# Altium footprint library MY_LIB_Connectors.PcbLib: 358 footprints (part 16 of 23)
Each footprint in its own frame and in the unit in brackets; x right, y up, seen from the top. Pads: shape width x height; smd on the part's side, far side on the other; paste and mask are expansions set on the pad; w line width, h text height; cw(c..) or ccw(c..) is an arc to the next point about the centre after c.
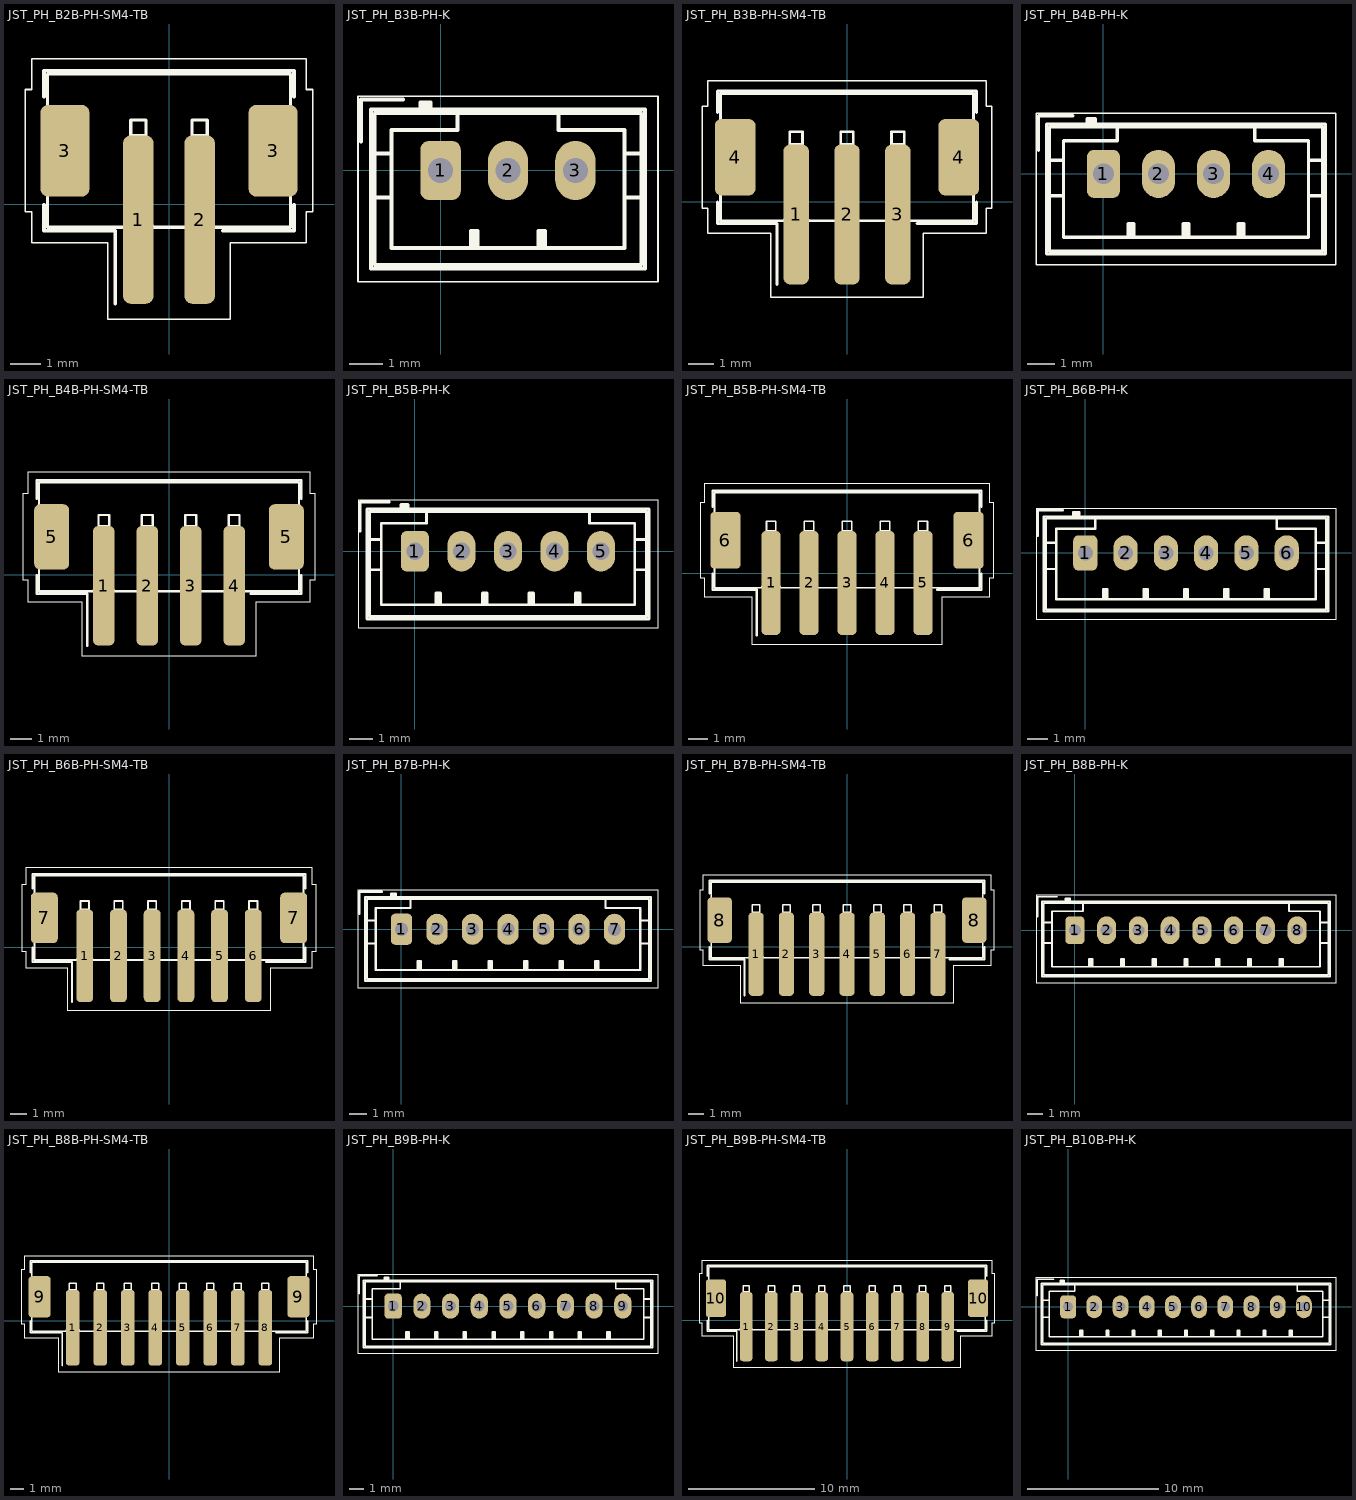
[diagram p15: the footprints below, top view; thin cyan lines are the x and y axes]

## JST_PH_B2B-PH-SM4-TB [mm] "JST B2B-PH-SM4-TB; reviewed KiCad footprint; ready STEP reference model"
height 6.725
pads (4):
  rrect50% 1x5.5 all layers, no hole: 1(-1,-0.5) 2(1,-0.5)
  rrect31% 1.6x3 all layers, no hole: 3(-3.4,1.75) 3(3.4,1.75)
Top Overlay:
  lines w0.05: -4.7,-0.25 -4.7,3.75 -4.48,3.75 -4.48,4.75 4.48,4.75 4.48,3.75 4.7,3.75 4.7,-0.25 4.48,-0.25 4.48,-1.25 2,-1.25 2,-3.75 -2,-3.75 -2,-1.25 -4.48,-1.25 -4.48,-0.25 -4.7,-0.25
  lines w0.1: -1.5,-0.75 -1,-0.043 -0.5,-0.75 ; -3.975,-0.75 -3.975,4.25 3.975,4.25 3.975,-0.75 -3.975,-0.75 ; -1.25,2.25 -0.75,2.25 -0.75,2.75 -1.25,2.75 -1.25,2.25 ; 0.75,2.25 1.25,2.25 1.25,2.75 0.75,2.75 0.75,2.25
  lines w0.12: -4.085,-0.01 -4.085,-0.86 -1.76,-0.86 -1.76,-3.25 ; -4.085,3.51 -4.085,4.36 4.085,4.36 4.085,3.51 ; 1.76,-0.86 4.085,-0.86 4.085,-0.01
3D body "JST-B2B-PH-SM4-TB.STEP": height 6.73, standoff 0, extent -3.975,-0.75 3.975,4.25

## JST_PH_B3B-PH-K [mm] "JST B3B-PH-K; reviewed KiCad footprint; ready STEP reference model"
height 6
pads (3):
  rrect42% 1.2x1.75 hole 0.75: 1(0,0)
  oval 1.2x1.75 hole 0.75: 2(2,0) 3(4,0)
Top Overlay:
  lines w0.05: -2.45,-3.3 -2.45,2.2 6.45,2.2 6.45,-3.3 -2.45,-3.3
  lines w0.1: -2.36,0.86 -2.36,2.11 -1.11,2.11 ; -1.95,-2.8 -1.95,1.7 5.95,1.7 5.95,-2.8 -1.95,-2.8
  lines w0.12: -2.36,0.86 -2.36,2.11 -1.11,2.11 ; -2.06,-0.8 -1.45,-0.8 ; -2.06,0.5 -1.45,0.5 ; -0.6,1.81 -0.6,2.01 -0.3,2.01 -0.3,1.81 ; -0.6,1.91 -0.3,1.91 ; 0.5,1.81 0.5,1.2 -1.45,1.2 -1.45,-2.3 5.45,-2.3 5.45,1.2 3.5,1.2 3.5,1.81 ; 0.9,-2.3 0.9,-1.8 1.1,-1.8 1.1,-2.3 ; 1,-2.3 1,-1.8 ; 2.9,-2.3 2.9,-1.8 3.1,-1.8 3.1,-2.3 ; 3,-2.3 3,-1.8 ; 5.45,-0.8 6.06,-0.8 ; 5.45,0.5 6.06,0.5 ; -2.06,-2.91 -2.06,1.81 6.06,1.81 6.06,-2.91 -2.06,-2.91
3D body "JST_PH_B3B-PH-K_1x03_P2.00mm_Vertical.step": height 6, standoff -3.4, extent -2.36,-2.8 5.95,2.11

## JST_PH_B3B-PH-SM4-TB [mm] "JST B3B-PH-SM4-TB; reviewed KiCad footprint; ready STEP reference model"
height 6.725
pads (5):
  rrect50% 1x5.5 all layers, no hole: 1(-2,-0.5) 2(0,-0.5) 3(2,-0.5)
  rrect31% 1.6x3 all layers, no hole: 4(-4.4,1.75) 4(4.4,1.75)
Top Overlay:
  lines w0.05: -5.7,-0.25 -5.7,3.75 -5.48,3.75 -5.48,4.75 5.48,4.75 5.48,3.75 5.7,3.75 5.7,-0.25 5.48,-0.25 5.48,-1.25 3,-1.25 3,-3.75 -3,-3.75 -3,-1.25 -5.48,-1.25 -5.48,-0.25 -5.7,-0.25
  lines w0.1: -2.5,-0.75 -2,-0.043 -1.5,-0.75 ; -4.975,-0.75 -4.975,4.25 4.975,4.25 4.975,-0.75 -4.975,-0.75 ; -2.25,2.25 -1.75,2.25 -1.75,2.75 -2.25,2.75 -2.25,2.25 ; -0.25,2.25 0.25,2.25 0.25,2.75 -0.25,2.75 -0.25,2.25 ; 1.75,2.25 2.25,2.25 2.25,2.75 1.75,2.75 1.75,2.25
  lines w0.12: -5.085,-0.01 -5.085,-0.86 -2.76,-0.86 -2.76,-3.25 ; -5.085,3.51 -5.085,4.36 5.085,4.36 5.085,3.51 ; 2.76,-0.86 5.085,-0.86 5.085,-0.01
3D body "JST-B3B-PH-SM4-TB.STEP": height 6.73, standoff 0, extent -4.975,-0.75 4.975,4.25

## JST_PH_B4B-PH-K [mm] "JST B4B-PH-K; reviewed KiCad footprint; ready STEP reference model"
height 6
pads (4):
  rrect42% 1.2x1.75 hole 0.75: 1(0,0)
  oval 1.2x1.75 hole 0.75: 2(2,0) 3(4,0) 4(6,0)
Top Overlay:
  lines w0.05: -2.45,-3.3 -2.45,2.2 8.45,2.2 8.45,-3.3 -2.45,-3.3
  lines w0.1: -2.36,0.86 -2.36,2.11 -1.11,2.11 ; -1.95,-2.8 -1.95,1.7 7.95,1.7 7.95,-2.8 -1.95,-2.8
  lines w0.12: -2.36,0.86 -2.36,2.11 -1.11,2.11 ; -2.06,-0.8 -1.45,-0.8 ; -2.06,0.5 -1.45,0.5 ; -0.6,1.81 -0.6,2.01 -0.3,2.01 -0.3,1.81 ; -0.6,1.91 -0.3,1.91 ; 0.5,1.81 0.5,1.2 -1.45,1.2 -1.45,-2.3 7.45,-2.3 7.45,1.2 5.5,1.2 5.5,1.81 ; 0.9,-2.3 0.9,-1.8 1.1,-1.8 1.1,-2.3 ; 1,-2.3 1,-1.8 ; 2.9,-2.3 2.9,-1.8 3.1,-1.8 3.1,-2.3 ; 3,-2.3 3,-1.8 ; 4.9,-2.3 4.9,-1.8 5.1,-1.8 5.1,-2.3 ; 5,-2.3 5,-1.8 ; 7.45,-0.8 8.06,-0.8 ; 7.45,0.5 8.06,0.5 ; -2.06,-2.91 -2.06,1.81 8.06,1.81 8.06,-2.91 -2.06,-2.91
3D body "JST_PH_B4B-PH-K_1x04_P2.00mm_Vertical.step": height 6, standoff -3.4, extent -2.36,-2.8 7.95,2.11

## JST_PH_B4B-PH-SM4-TB [mm] "JST B4B-PH-SM4-TB; reviewed KiCad footprint; ready STEP reference model"
height 6.725
pads (6):
  rrect50% 1x5.5 all layers, no hole: 1(-3,-0.5) 2(-1,-0.5) 3(1,-0.5) 4(3,-0.5)
  rrect31% 1.6x3 all layers, no hole: 5(-5.4,1.75) 5(5.4,1.75)
Top Overlay:
  lines w0.05: -6.7,-0.25 -6.7,3.75 -6.48,3.75 -6.48,4.75 6.48,4.75 6.48,3.75 6.7,3.75 6.7,-0.25 6.48,-0.25 6.48,-1.25 4,-1.25 4,-3.75 -4,-3.75 -4,-1.25 -6.48,-1.25 -6.48,-0.25 -6.7,-0.25
  lines w0.1: -3.5,-0.75 -3,-0.043 -2.5,-0.75 ; -5.975,-0.75 -5.975,4.25 5.975,4.25 5.975,-0.75 -5.975,-0.75 ; -3.25,2.25 -2.75,2.25 -2.75,2.75 -3.25,2.75 -3.25,2.25 ; -1.25,2.25 -0.75,2.25 -0.75,2.75 -1.25,2.75 -1.25,2.25 ; 0.75,2.25 1.25,2.25 1.25,2.75 0.75,2.75 0.75,2.25 ; 2.75,2.25 3.25,2.25 3.25,2.75 2.75,2.75 2.75,2.25
  lines w0.12: -6.085,-0.01 -6.085,-0.86 -3.76,-0.86 -3.76,-3.25 ; -6.085,3.51 -6.085,4.36 6.085,4.36 6.085,3.51 ; 3.76,-0.86 6.085,-0.86 6.085,-0.01
3D body "JST-B4B-PH-SM4-TB.STEP": height 6.73, standoff 0, extent -5.975,-0.75 5.975,4.25

## JST_PH_B5B-PH-K [mm] "JST B5B-PH-K; reviewed KiCad footprint; ready STEP reference model"
height 6
pads (5):
  rrect42% 1.2x1.75 hole 0.75: 1(0,0)
  oval 1.2x1.75 hole 0.75: 2(2,0) 3(4,0) 4(6,0) 5(8,0)
Top Overlay:
  lines w0.05: -2.45,-3.3 -2.45,2.2 10.45,2.2 10.45,-3.3 -2.45,-3.3
  lines w0.1: -2.36,0.86 -2.36,2.11 -1.11,2.11 ; -1.95,-2.8 -1.95,1.7 9.95,1.7 9.95,-2.8 -1.95,-2.8
  lines w0.12: -2.36,0.86 -2.36,2.11 -1.11,2.11 ; -2.06,-0.8 -1.45,-0.8 ; -2.06,0.5 -1.45,0.5 ; -0.6,1.81 -0.6,2.01 -0.3,2.01 -0.3,1.81 ; -0.6,1.91 -0.3,1.91 ; 0.5,1.81 0.5,1.2 -1.45,1.2 -1.45,-2.3 9.45,-2.3 9.45,1.2 7.5,1.2 7.5,1.81 ; 0.9,-2.3 0.9,-1.8 1.1,-1.8 1.1,-2.3 ; 1,-2.3 1,-1.8 ; 2.9,-2.3 2.9,-1.8 3.1,-1.8 3.1,-2.3 ; 3,-2.3 3,-1.8 ; 4.9,-2.3 4.9,-1.8 5.1,-1.8 5.1,-2.3 ; 5,-2.3 5,-1.8 ; 6.9,-2.3 6.9,-1.8 7.1,-1.8 7.1,-2.3 ; 7,-2.3 7,-1.8 ; 9.45,-0.8 10.06,-0.8 ; 9.45,0.5 10.06,0.5 ; -2.06,-2.91 -2.06,1.81 10.06,1.81 10.06,-2.91 -2.06,-2.91
3D body "JST_PH_B5B-PH-K_1x05_P2.00mm_Vertical.step": height 6, standoff -3.4, extent -2.36,-2.8 9.95,2.11

## JST_PH_B5B-PH-SM4-TB [mm] "JST B5B-PH-SM4-TB; reviewed KiCad footprint; ready STEP reference model"
height 6.725
pads (7):
  rrect50% 1x5.5 all layers, no hole: 1(-4,-0.5) 2(-2,-0.5) 3(0,-0.5) 4(2,-0.5) 5(4,-0.5)
  rrect31% 1.6x3 all layers, no hole: 6(-6.4,1.75) 6(6.4,1.75)
Top Overlay:
  lines w0.05: -7.7,-0.25 -7.7,3.75 -7.48,3.75 -7.48,4.75 7.48,4.75 7.48,3.75 7.7,3.75 7.7,-0.25 7.48,-0.25 7.48,-1.25 5,-1.25 5,-3.75 -5,-3.75 -5,-1.25 -7.48,-1.25 -7.48,-0.25 -7.7,-0.25
  lines w0.1: -4.5,-0.75 -4,-0.043 -3.5,-0.75 ; -6.975,-0.75 -6.975,4.25 6.975,4.25 6.975,-0.75 -6.975,-0.75 ; -4.25,2.25 -3.75,2.25 -3.75,2.75 -4.25,2.75 -4.25,2.25 ; -2.25,2.25 -1.75,2.25 -1.75,2.75 -2.25,2.75 -2.25,2.25 ; -0.25,2.25 0.25,2.25 0.25,2.75 -0.25,2.75 -0.25,2.25 ; 1.75,2.25 2.25,2.25 2.25,2.75 1.75,2.75 1.75,2.25 ; 3.75,2.25 4.25,2.25 4.25,2.75 3.75,2.75 3.75,2.25
  lines w0.12: -7.085,-0.01 -7.085,-0.86 -4.76,-0.86 -4.76,-3.25 ; -7.085,3.51 -7.085,4.36 7.085,4.36 7.085,3.51 ; 4.76,-0.86 7.085,-0.86 7.085,-0.01
3D body "JST-B5B-PH-SM4-TB.STEP": height 6.73, standoff 0, extent -6.975,-0.75 6.975,4.25

## JST_PH_B6B-PH-K [mm] "JST B6B-PH-K; reviewed KiCad footprint; ready STEP reference model"
height 6
pads (6):
  rrect42% 1.2x1.75 hole 0.75: 1(0,0)
  oval 1.2x1.75 hole 0.75: 2(2,0) 3(4,0) 4(6,0) 5(8,0) 6(10,0)
Top Overlay:
  lines w0.05: -2.45,-3.3 -2.45,2.2 12.45,2.2 12.45,-3.3 -2.45,-3.3
  lines w0.1: -2.36,0.86 -2.36,2.11 -1.11,2.11 ; -1.95,-2.8 -1.95,1.7 11.95,1.7 11.95,-2.8 -1.95,-2.8
  lines w0.12: -2.36,0.86 -2.36,2.11 -1.11,2.11 ; -2.06,-0.8 -1.45,-0.8 ; -2.06,0.5 -1.45,0.5 ; -0.6,1.81 -0.6,2.01 -0.3,2.01 -0.3,1.81 ; -0.6,1.91 -0.3,1.91 ; 0.5,1.81 0.5,1.2 -1.45,1.2 -1.45,-2.3 11.45,-2.3 11.45,1.2 9.5,1.2 9.5,1.81 ; 0.9,-2.3 0.9,-1.8 1.1,-1.8 1.1,-2.3 ; 1,-2.3 1,-1.8 ; 2.9,-2.3 2.9,-1.8 3.1,-1.8 3.1,-2.3 ; 3,-2.3 3,-1.8 ; 4.9,-2.3 4.9,-1.8 5.1,-1.8 5.1,-2.3 ; 5,-2.3 5,-1.8 ; 6.9,-2.3 6.9,-1.8 7.1,-1.8 7.1,-2.3 ; 7,-2.3 7,-1.8 ; 8.9,-2.3 8.9,-1.8 9.1,-1.8 9.1,-2.3 ; 9,-2.3 9,-1.8 ; 11.45,-0.8 12.06,-0.8 ; 11.45,0.5 12.06,0.5 ; -2.06,-2.91 -2.06,1.81 12.06,1.81 12.06,-2.91 -2.06,-2.91
3D body "JST_PH_B6B-PH-K_1x06_P2.00mm_Vertical.step": height 6, standoff -3.4, extent -2.36,-2.8 11.95,2.11

## JST_PH_B6B-PH-SM4-TB [mm] "JST B6B-PH-SM4-TB; reviewed KiCad footprint; ready STEP reference model"
height 6.725
pads (8):
  rrect50% 1x5.5 all layers, no hole: 1(-5,-0.5) 2(-3,-0.5) 3(-1,-0.5) 4(1,-0.5) 5(3,-0.5) 6(5,-0.5)
  rrect31% 1.6x3 all layers, no hole: 7(-7.4,1.75) 7(7.4,1.75)
Top Overlay:
  lines w0.05: -8.7,-0.25 -8.7,3.75 -8.48,3.75 -8.48,4.75 8.48,4.75 8.48,3.75 8.7,3.75 8.7,-0.25 8.48,-0.25 8.48,-1.25 6,-1.25 6,-3.75 -6,-3.75 -6,-1.25 -8.48,-1.25 -8.48,-0.25 -8.7,-0.25
  lines w0.1: -5.5,-0.75 -5,-0.043 -4.5,-0.75 ; -7.975,-0.75 -7.975,4.25 7.975,4.25 7.975,-0.75 -7.975,-0.75 ; -5.25,2.25 -4.75,2.25 -4.75,2.75 -5.25,2.75 -5.25,2.25 ; -3.25,2.25 -2.75,2.25 -2.75,2.75 -3.25,2.75 -3.25,2.25 ; -1.25,2.25 -0.75,2.25 -0.75,2.75 -1.25,2.75 -1.25,2.25 ; 0.75,2.25 1.25,2.25 1.25,2.75 0.75,2.75 0.75,2.25 ; 2.75,2.25 3.25,2.25 3.25,2.75 2.75,2.75 2.75,2.25 ; 4.75,2.25 5.25,2.25 5.25,2.75 4.75,2.75 4.75,2.25
  lines w0.12: -8.085,-0.01 -8.085,-0.86 -5.76,-0.86 -5.76,-3.25 ; -8.085,3.51 -8.085,4.36 8.085,4.36 8.085,3.51 ; 5.76,-0.86 8.085,-0.86 8.085,-0.01
3D body "JST-B6B-PH-SM4-TB.STEP": height 6.73, standoff 0, extent -7.975,-0.75 7.975,4.25

## JST_PH_B7B-PH-K [mm] "JST B7B-PH-K; reviewed KiCad footprint; ready STEP reference model"
height 6
pads (7):
  rrect42% 1.2x1.75 hole 0.75: 1(0,0)
  oval 1.2x1.75 hole 0.75: 2(2,0) 3(4,0) 4(6,0) 5(8,0) 6(10,0) 7(12,0)
Top Overlay:
  lines w0.05: -2.45,-3.3 -2.45,2.2 14.45,2.2 14.45,-3.3 -2.45,-3.3
  lines w0.1: -2.36,0.86 -2.36,2.11 -1.11,2.11 ; -1.95,-2.8 -1.95,1.7 13.95,1.7 13.95,-2.8 -1.95,-2.8
  lines w0.12: -2.36,0.86 -2.36,2.11 -1.11,2.11 ; -2.06,-0.8 -1.45,-0.8 ; -2.06,0.5 -1.45,0.5 ; -0.6,1.81 -0.6,2.01 -0.3,2.01 -0.3,1.81 ; -0.6,1.91 -0.3,1.91 ; 0.5,1.81 0.5,1.2 -1.45,1.2 -1.45,-2.3 13.45,-2.3 13.45,1.2 11.5,1.2 11.5,1.81 ; 0.9,-2.3 0.9,-1.8 1.1,-1.8 1.1,-2.3 ; 1,-2.3 1,-1.8 ; 2.9,-2.3 2.9,-1.8 3.1,-1.8 3.1,-2.3 ; 3,-2.3 3,-1.8 ; 4.9,-2.3 4.9,-1.8 5.1,-1.8 5.1,-2.3 ; 5,-2.3 5,-1.8 ; 6.9,-2.3 6.9,-1.8 7.1,-1.8 7.1,-2.3 ; 7,-2.3 7,-1.8 ; 8.9,-2.3 8.9,-1.8 9.1,-1.8 9.1,-2.3 ; 9,-2.3 9,-1.8 ; 10.9,-2.3 10.9,-1.8 11.1,-1.8 11.1,-2.3 ; 11,-2.3 11,-1.8 ; 13.45,-0.8 14.06,-0.8 ; 13.45,0.5 14.06,0.5 ; -2.06,-2.91 -2.06,1.81 14.06,1.81 14.06,-2.91 -2.06,-2.91
3D body "JST_PH_B7B-PH-K_1x07_P2.00mm_Vertical.step": height 6, standoff -3.4, extent -2.36,-2.8 13.95,2.11

## JST_PH_B7B-PH-SM4-TB [mm] "JST B7B-PH-SM4-TB; reviewed KiCad footprint; ready STEP reference model"
height 6.725
pads (9):
  rrect50% 1x5.5 all layers, no hole: 1(-6,-0.5) 2(-4,-0.5) 3(-2,-0.5) 4(0,-0.5) 5(2,-0.5) 6(4,-0.5) 7(6,-0.5)
  rrect31% 1.6x3 all layers, no hole: 8(-8.4,1.75) 8(8.4,1.75)
Top Overlay:
  lines w0.05: -9.7,-0.25 -9.7,3.75 -9.48,3.75 -9.48,4.75 9.48,4.75 9.48,3.75 9.7,3.75 9.7,-0.25 9.48,-0.25 9.48,-1.25 7,-1.25 7,-3.75 -7,-3.75 -7,-1.25 -9.48,-1.25 -9.48,-0.25 -9.7,-0.25
  lines w0.1: -6.5,-0.75 -6,-0.043 -5.5,-0.75 ; -8.975,-0.75 -8.975,4.25 8.975,4.25 8.975,-0.75 -8.975,-0.75 ; -6.25,2.25 -5.75,2.25 -5.75,2.75 -6.25,2.75 -6.25,2.25 ; -4.25,2.25 -3.75,2.25 -3.75,2.75 -4.25,2.75 -4.25,2.25 ; -2.25,2.25 -1.75,2.25 -1.75,2.75 -2.25,2.75 -2.25,2.25 ; -0.25,2.25 0.25,2.25 0.25,2.75 -0.25,2.75 -0.25,2.25 ; 1.75,2.25 2.25,2.25 2.25,2.75 1.75,2.75 1.75,2.25 ; 3.75,2.25 4.25,2.25 4.25,2.75 3.75,2.75 3.75,2.25 ; 5.75,2.25 6.25,2.25 6.25,2.75 5.75,2.75 5.75,2.25
  lines w0.12: -9.085,-0.01 -9.085,-0.86 -6.76,-0.86 -6.76,-3.25 ; -9.085,3.51 -9.085,4.36 9.085,4.36 9.085,3.51 ; 6.76,-0.86 9.085,-0.86 9.085,-0.01
3D body "JST-B7B-PH-SM4-TB.STEP": height 6.73, standoff 0, extent -8.975,-0.75 8.975,4.25

## JST_PH_B8B-PH-K [mm] "JST B8B-PH-K; reviewed KiCad footprint; ready STEP reference model"
height 6
pads (8):
  rrect42% 1.2x1.75 hole 0.75: 1(0,0)
  oval 1.2x1.75 hole 0.75: 2(2,0) 3(4,0) 4(6,0) 5(8,0) 6(10,0) 7(12,0) 8(14,0)
Top Overlay:
  lines w0.05: -2.45,-3.3 -2.45,2.2 16.45,2.2 16.45,-3.3 -2.45,-3.3
  lines w0.1: -2.36,0.86 -2.36,2.11 -1.11,2.11 ; -1.95,-2.8 -1.95,1.7 15.95,1.7 15.95,-2.8 -1.95,-2.8
  lines w0.12: -2.36,0.86 -2.36,2.11 -1.11,2.11 ; -2.06,-0.8 -1.45,-0.8 ; -2.06,0.5 -1.45,0.5 ; -0.6,1.81 -0.6,2.01 -0.3,2.01 -0.3,1.81 ; -0.6,1.91 -0.3,1.91 ; 0.5,1.81 0.5,1.2 -1.45,1.2 -1.45,-2.3 15.45,-2.3 15.45,1.2 13.5,1.2 13.5,1.81 ; 0.9,-2.3 0.9,-1.8 1.1,-1.8 1.1,-2.3 ; 1,-2.3 1,-1.8 ; 2.9,-2.3 2.9,-1.8 3.1,-1.8 3.1,-2.3 ; 3,-2.3 3,-1.8 ; 4.9,-2.3 4.9,-1.8 5.1,-1.8 5.1,-2.3 ; 5,-2.3 5,-1.8 ; 6.9,-2.3 6.9,-1.8 7.1,-1.8 7.1,-2.3 ; 7,-2.3 7,-1.8 ; 8.9,-2.3 8.9,-1.8 9.1,-1.8 9.1,-2.3 ; 9,-2.3 9,-1.8 ; 10.9,-2.3 10.9,-1.8 11.1,-1.8 11.1,-2.3 ; 11,-2.3 11,-1.8 ; 12.9,-2.3 12.9,-1.8 13.1,-1.8 13.1,-2.3 ; 13,-2.3 13,-1.8 ; 15.45,-0.8 16.06,-0.8 ; 15.45,0.5 16.06,0.5 ; -2.06,-2.91 -2.06,1.81 16.06,1.81 16.06,-2.91 -2.06,-2.91
3D body "JST_PH_B8B-PH-K_1x08_P2.00mm_Vertical.step": height 6, standoff -3.4, extent -2.36,-2.8 15.95,2.11

## JST_PH_B8B-PH-SM4-TB [mm] "JST B8B-PH-SM4-TB; reviewed KiCad footprint; ready STEP reference model"
height 6.725
pads (10):
  rrect50% 1x5.5 all layers, no hole: 1(-7,-0.5) 2(-5,-0.5) 3(-3,-0.5) 4(-1,-0.5) 5(1,-0.5) 6(3,-0.5) 7(5,-0.5) 8(7,-0.5)
  rrect31% 1.6x3 all layers, no hole: 9(-9.4,1.75) 9(9.4,1.75)
Top Overlay:
  lines w0.05: -10.7,-0.25 -10.7,3.75 -10.48,3.75 -10.48,4.75 10.48,4.75 10.48,3.75 10.7,3.75 10.7,-0.25 10.48,-0.25 10.48,-1.25 8,-1.25 8,-3.75 -8,-3.75 -8,-1.25 -10.48,-1.25 -10.48,-0.25 -10.7,-0.25
  lines w0.1: -7.5,-0.75 -7,-0.043 -6.5,-0.75 ; -9.975,-0.75 -9.975,4.25 9.975,4.25 9.975,-0.75 -9.975,-0.75 ; -7.25,2.25 -6.75,2.25 -6.75,2.75 -7.25,2.75 -7.25,2.25 ; -5.25,2.25 -4.75,2.25 -4.75,2.75 -5.25,2.75 -5.25,2.25 ; -3.25,2.25 -2.75,2.25 -2.75,2.75 -3.25,2.75 -3.25,2.25 ; -1.25,2.25 -0.75,2.25 -0.75,2.75 -1.25,2.75 -1.25,2.25 ; 0.75,2.25 1.25,2.25 1.25,2.75 0.75,2.75 0.75,2.25 ; 2.75,2.25 3.25,2.25 3.25,2.75 2.75,2.75 2.75,2.25 ; 4.75,2.25 5.25,2.25 5.25,2.75 4.75,2.75 4.75,2.25 ; 6.75,2.25 7.25,2.25 7.25,2.75 6.75,2.75 6.75,2.25
  lines w0.12: -10.085,-0.01 -10.085,-0.86 -7.76,-0.86 -7.76,-3.25 ; -10.085,3.51 -10.085,4.36 10.085,4.36 10.085,3.51 ; 7.76,-0.86 10.085,-0.86 10.085,-0.01
3D body "JST-B8B-PH-SM4-TB.STEP": height 6.73, standoff 0, extent -9.975,-0.75 9.975,4.25

## JST_PH_B9B-PH-K [mm] "JST B9B-PH-K; reviewed KiCad footprint; ready STEP reference model"
height 6
pads (9):
  rrect42% 1.2x1.75 hole 0.75: 1(0,0)
  oval 1.2x1.75 hole 0.75: 2(2,0) 3(4,0) 4(6,0) 5(8,0) 6(10,0) 7(12,0) 8(14,0) 9(16,0)
Top Overlay:
  lines w0.05: -2.45,-3.3 -2.45,2.2 18.45,2.2 18.45,-3.3 -2.45,-3.3
  lines w0.1: -2.36,0.86 -2.36,2.11 -1.11,2.11 ; -1.95,-2.8 -1.95,1.7 17.95,1.7 17.95,-2.8 -1.95,-2.8
  lines w0.12: -2.36,0.86 -2.36,2.11 -1.11,2.11 ; -2.06,-0.8 -1.45,-0.8 ; -2.06,0.5 -1.45,0.5 ; -0.6,1.81 -0.6,2.01 -0.3,2.01 -0.3,1.81 ; -0.6,1.91 -0.3,1.91 ; 0.5,1.81 0.5,1.2 -1.45,1.2 -1.45,-2.3 17.45,-2.3 17.45,1.2 15.5,1.2 15.5,1.81 ; 0.9,-2.3 0.9,-1.8 1.1,-1.8 1.1,-2.3 ; 1,-2.3 1,-1.8 ; 2.9,-2.3 2.9,-1.8 3.1,-1.8 3.1,-2.3 ; 3,-2.3 3,-1.8 ; 4.9,-2.3 4.9,-1.8 5.1,-1.8 5.1,-2.3 ; 5,-2.3 5,-1.8 ; 6.9,-2.3 6.9,-1.8 7.1,-1.8 7.1,-2.3 ; 7,-2.3 7,-1.8 ; 8.9,-2.3 8.9,-1.8 9.1,-1.8 9.1,-2.3 ; 9,-2.3 9,-1.8 ; 10.9,-2.3 10.9,-1.8 11.1,-1.8 11.1,-2.3 ; 11,-2.3 11,-1.8 ; 12.9,-2.3 12.9,-1.8 13.1,-1.8 13.1,-2.3 ; 13,-2.3 13,-1.8 ; 14.9,-2.3 14.9,-1.8 15.1,-1.8 15.1,-2.3 ; 15,-2.3 15,-1.8 ; 17.45,-0.8 18.06,-0.8 ; 17.45,0.5 18.06,0.5 ; -2.06,-2.91 -2.06,1.81 18.06,1.81 18.06,-2.91 -2.06,-2.91
3D body "JST_PH_B9B-PH-K_1x09_P2.00mm_Vertical.step": height 6, standoff -3.4, extent -2.36,-2.8 17.95,2.11

## JST_PH_B9B-PH-SM4-TB [mm] "JST B9B-PH-SM4-TB; reviewed KiCad footprint; ready STEP reference model"
height 6.725
pads (11):
  rrect50% 1x5.5 all layers, no hole: 1(-8,-0.5) 2(-6,-0.5) 3(-4,-0.5) 4(-2,-0.5) 5(0,-0.5) 6(2,-0.5) 7(4,-0.5) 8(6,-0.5) 9(8,-0.5)
  rrect31% 1.6x3 all layers, no hole: 10(-10.4,1.75) 10(10.4,1.75)
Top Overlay:
  lines w0.05: -11.7,-0.25 -11.7,3.75 -11.48,3.75 -11.48,4.75 11.48,4.75 11.48,3.75 11.7,3.75 11.7,-0.25 11.48,-0.25 11.48,-1.25 9,-1.25 9,-3.75 -9,-3.75 -9,-1.25 -11.48,-1.25 -11.48,-0.25 -11.7,-0.25
  lines w0.1: -8.5,-0.75 -8,-0.043 -7.5,-0.75 ; -10.975,-0.75 -10.975,4.25 10.975,4.25 10.975,-0.75 -10.975,-0.75 ; -8.25,2.25 -7.75,2.25 -7.75,2.75 -8.25,2.75 -8.25,2.25 ; -6.25,2.25 -5.75,2.25 -5.75,2.75 -6.25,2.75 -6.25,2.25 ; -4.25,2.25 -3.75,2.25 -3.75,2.75 -4.25,2.75 -4.25,2.25 ; -2.25,2.25 -1.75,2.25 -1.75,2.75 -2.25,2.75 -2.25,2.25 ; -0.25,2.25 0.25,2.25 0.25,2.75 -0.25,2.75 -0.25,2.25 ; 1.75,2.25 2.25,2.25 2.25,2.75 1.75,2.75 1.75,2.25 ; 3.75,2.25 4.25,2.25 4.25,2.75 3.75,2.75 3.75,2.25 ; 5.75,2.25 6.25,2.25 6.25,2.75 5.75,2.75 5.75,2.25 ; 7.75,2.25 8.25,2.25 8.25,2.75 7.75,2.75 7.75,2.25
  lines w0.12: -11.085,-0.01 -11.085,-0.86 -8.76,-0.86 -8.76,-3.25 ; -11.085,3.51 -11.085,4.36 11.085,4.36 11.085,3.51 ; 8.76,-0.86 11.085,-0.86 11.085,-0.01
3D body "JST-B9B-PH-SM4-TB.STEP": height 6.73, standoff 0, extent -10.975,-0.75 10.975,4.25

## JST_PH_B10B-PH-K [mm] "JST B10B-PH-K; reviewed KiCad footprint; ready STEP reference model"
height 6
pads (10):
  rrect42% 1.2x1.75 hole 0.75: 1(0,0)
  oval 1.2x1.75 hole 0.75: 2(2,0) 3(4,0) 4(6,0) 5(8,0) 6(10,0) 7(12,0) 8(14,0) 9(16,0) 10(18,0)
Top Overlay:
  lines w0.05: -2.45,-3.3 -2.45,2.2 20.45,2.2 20.45,-3.3 -2.45,-3.3
  lines w0.1: -2.36,0.86 -2.36,2.11 -1.11,2.11 ; -1.95,-2.8 -1.95,1.7 19.95,1.7 19.95,-2.8 -1.95,-2.8
  lines w0.12: -2.36,0.86 -2.36,2.11 -1.11,2.11 ; -2.06,-0.8 -1.45,-0.8 ; -2.06,0.5 -1.45,0.5 ; -0.6,1.81 -0.6,2.01 -0.3,2.01 -0.3,1.81 ; -0.6,1.91 -0.3,1.91 ; 0.5,1.81 0.5,1.2 -1.45,1.2 -1.45,-2.3 19.45,-2.3 19.45,1.2 17.5,1.2 17.5,1.81 ; 0.9,-2.3 0.9,-1.8 1.1,-1.8 1.1,-2.3 ; 1,-2.3 1,-1.8 ; 2.9,-2.3 2.9,-1.8 3.1,-1.8 3.1,-2.3 ; 3,-2.3 3,-1.8 ; 4.9,-2.3 4.9,-1.8 5.1,-1.8 5.1,-2.3 ; 5,-2.3 5,-1.8 ; 6.9,-2.3 6.9,-1.8 7.1,-1.8 7.1,-2.3 ; 7,-2.3 7,-1.8 ; 8.9,-2.3 8.9,-1.8 9.1,-1.8 9.1,-2.3 ; 9,-2.3 9,-1.8 ; 10.9,-2.3 10.9,-1.8 11.1,-1.8 11.1,-2.3 ; 11,-2.3 11,-1.8 ; 12.9,-2.3 12.9,-1.8 13.1,-1.8 13.1,-2.3 ; 13,-2.3 13,-1.8 ; 14.9,-2.3 14.9,-1.8 15.1,-1.8 15.1,-2.3 ; 15,-2.3 15,-1.8 ; 16.9,-2.3 16.9,-1.8 17.1,-1.8 17.1,-2.3 ; 17,-2.3 17,-1.8 ; 19.45,-0.8 20.06,-0.8 ; 19.45,0.5 20.06,0.5 ; -2.06,-2.91 -2.06,1.81 20.06,1.81 20.06,-2.91 -2.06,-2.91
3D body "JST_PH_B10B-PH-K_1x10_P2.00mm_Vertical.step": height 6, standoff -3.4, extent -2.36,-2.8 19.95,2.11